# EAGLE library part MCP6542-I/MS (library astra)
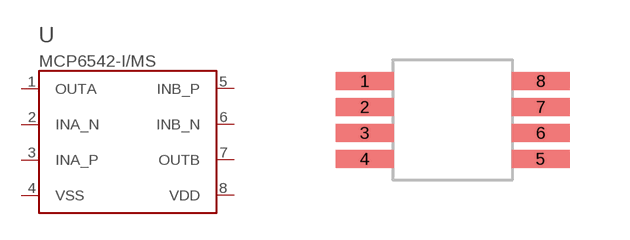
[diagram p5: symbol with the pads of MC_MSOP8_TEMP; footprint MC_MSOP8_TEMP]

Designator prefix U

## MCP6542-I/MS  [MC_MSOP8_TEMP]
1  OUTA  out
2  INA_N  in
3  INA_P  in
4  VSS  pwr
5  INB_P  in
6  INB_N  in
7  OUTB  out
8  VDD  pwr

## Footprint MC_MSOP8_TEMP (pad centres in mm)
Microchip MSOP 3x3, C04-2111-MS rev E. Pin1 top left. https://ww1.microchip.com/downloads/aemDocuments/documents/product-documents/package-drawings/08L-MSOP-3x3-MS-C04-00111e.pdf
smd 1.45 x 0.45: 1 -2.2,0.975; 2 -2.2,0.325; 3 -2.2,-0.325; 4 -2.2,-0.975; 5 2.2,-0.975; 6 2.2,-0.325; 7 2.2,0.325; 8 2.2,0.975